# Altium footprint library SmartClimate_BOM.PcbLib: 29 footprints (part 2 of 2)
Each footprint in its own frame and in the unit in brackets; x right, y up, seen from the top. Pads: shape width x height; smd on the part's side, far side on the other; paste and mask are expansions set on the pad; w line width, h text height; cw(c..) or ccw(c..) is an arc to the next point about the centre after c.
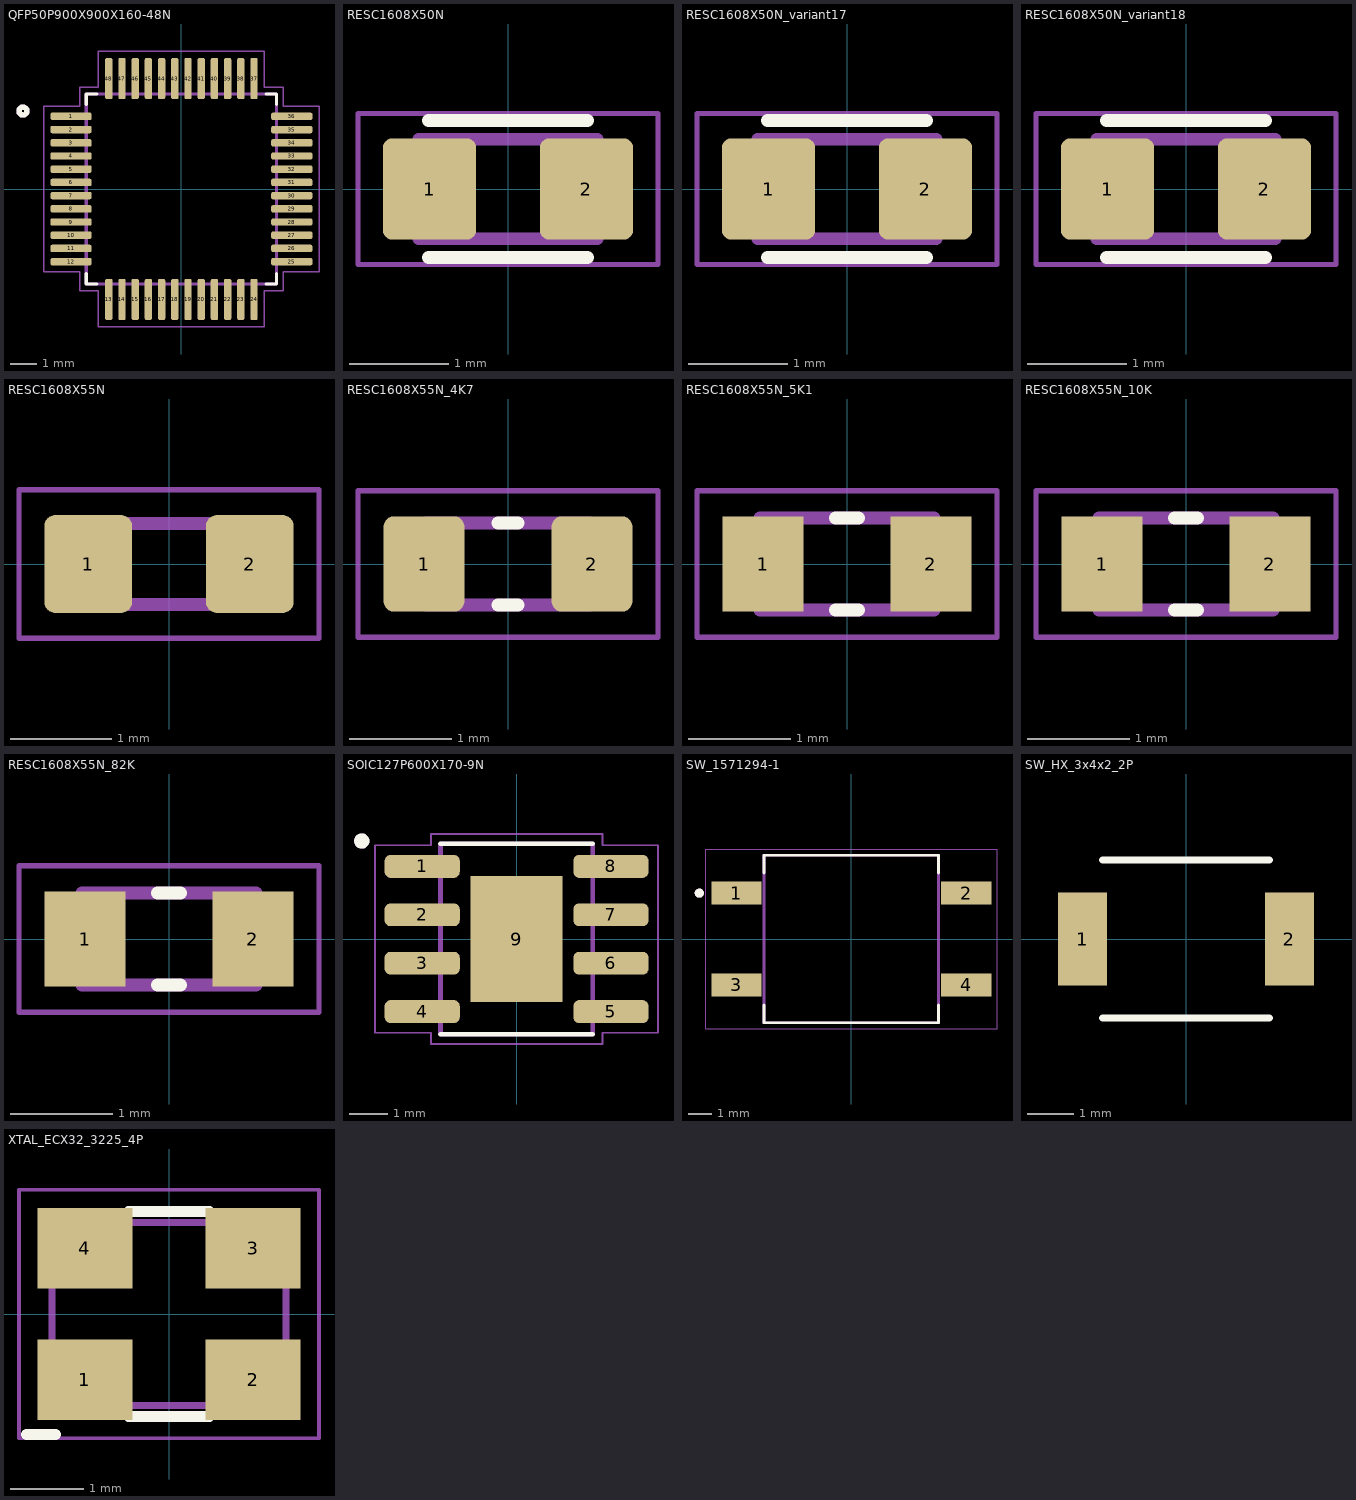
[diagram p1: the footprints below, top view; thin cyan lines are the x and y axes]

## QFP50P900X900X160-48N [mm]
pads (48):
  rrect50% 1.56x0.28 smd: 1(-4.18,2.75) 2(-4.18,2.25) 3(-4.18,1.75) 4(-4.18,1.25) 5(-4.18,0.75) 6(-4.18,0.25) 7(-4.18,-0.25) 8(-4.18,-0.75) 9(-4.18,-1.25) 10(-4.18,-1.75) 11(-4.18,-2.25) 12(-4.18,-2.75) 25(4.18,-2.75) 26(4.18,-2.25) 27(4.18,-1.75) 28(4.18,-1.25) 29(4.18,-0.75) 30(4.18,-0.25) 31(4.18,0.25) 32(4.18,0.75) 33(4.18,1.25) 34(4.18,1.75) 35(4.18,2.25) 36(4.18,2.75)
  rrect50% 0.28x1.56 smd: 13(-2.75,-4.18) 14(-2.25,-4.18) 15(-1.75,-4.18) 16(-1.25,-4.18) 17(-0.75,-4.18) 18(-0.25,-4.18) 19(0.25,-4.18) 20(0.75,-4.18) 21(1.25,-4.18) 22(1.75,-4.18) 23(2.25,-4.18) 24(2.75,-4.18) 37(2.75,4.18) 38(2.25,4.18) 39(1.75,4.18) 40(1.25,4.18) 41(0.75,4.18) 42(0.25,4.18) 43(-0.25,4.18) 44(-0.75,4.18) 45(-1.25,4.18) 46(-1.75,4.18) 47(-2.25,4.18) 48(-2.75,4.18)
Top Overlay:
  circle w0.2: c-6,2.95 r0.15
  lines w0.127: -3.6,-3.21 -3.6,-3.6 -3.21,-3.6 ; -3.6,3.21 -3.6,3.6 -3.21,3.6 ; 3.21,-3.6 3.6,-3.6 3.6,-3.21 ; 3.21,3.6 3.6,3.6 3.6,3.21
Mechanical 13:
  circle w0.2: c-6,2.95 r0.15
  lines w0.127: -3.6,-3.6 3.6,-3.6 3.6,3.6 -3.6,3.6 -3.6,-3.6
Mechanical 15:
  lines w0.05: -5.21,-3.14 -3.85,-3.14 -3.85,-3.85 -3.14,-3.85 -3.14,-5.21 3.14,-5.21 3.14,-3.85 3.85,-3.85 3.85,-3.14 5.21,-3.14 5.21,3.14 3.85,3.14 3.85,3.85 3.14,3.85 3.14,5.21 -3.14,5.21 -3.14,3.85 -3.85,3.85 -3.85,3.14 -5.21,3.14 -5.21,-3.14
3D body "step_temp.STEP": height 1.6, standoff 0, extent -4.5,-4.5 4.5,4.5

## RESC1608X50N [mm]
height 0.5
pads (2):
  rrect20% 0.94x1.02 smd: 1(-0.79,0) 2(0.79,0)
Top Overlay:
  lines w0.127: -0.8,-0.69 0.8,-0.69 ; -0.8,0.69 0.8,0.69
Mechanical 13:
  lines w0.127: -0.9,-0.5 0.9,-0.5 0.9,0.5 -0.9,0.5 -0.9,-0.5
Mechanical 15:
  lines w0.05: -1.51,-0.76 1.51,-0.76 1.51,0.76 -1.51,0.76 -1.51,-0.76
3D body: height 0.47, standoff 0.04, extent -0.8,-0.4 0.8,0.4
3D body: height 0.5, standoff 0.47, extent -0.5,-0.4 0.5,0.4
3D body: height 0.5, standoff 0, extent -0.8,-0.4 -0.55,0.4
3D body: height 0.5, standoff 0, extent 0.55,-0.4 0.8,0.4

## RESC1608X50N_variant17 [mm]
height 0.5
pads (2):
  rrect20% 0.94x1.02 smd: 1(-0.79,0) 2(0.79,0)
Top Overlay:
  lines w0.127: -0.8,-0.69 0.8,-0.69 ; -0.8,0.69 0.8,0.69
Mechanical 13:
  lines w0.127: -0.9,-0.5 -0.9,0.5 0.9,0.5 0.9,-0.5 -0.9,-0.5
Mechanical 15:
  lines w0.05: -1.51,-0.76 -1.51,0.76 1.51,0.76 1.51,-0.76 -1.51,-0.76
3D body: height 0.47, standoff 0.04, extent -0.8,-0.4 0.8,0.4
3D body: height 0.5, standoff 0.47, extent -0.5,-0.4 0.5,0.4
3D body: height 0.5, standoff 0, extent -0.8,-0.4 -0.55,0.4
3D body: height 0.5, standoff 0, extent 0.55,-0.4 0.8,0.4

## RESC1608X50N_variant18 [mm]
height 0.5
pads (2):
  rrect20% 0.94x1.02 smd: 1(-0.79,0) 2(0.79,0)
Top Overlay:
  lines w0.127: -0.8,-0.69 0.8,-0.69 ; -0.8,0.69 0.8,0.69
Mechanical 13:
  lines w0.127: -0.9,-0.5 -0.9,0.5 0.9,0.5 0.9,-0.5 -0.9,-0.5
Mechanical 15:
  lines w0.05: -1.51,-0.76 -1.51,0.76 1.51,0.76 1.51,-0.76 -1.51,-0.76
3D body: height 0.47, standoff 0.04, extent -0.8,-0.4 0.8,0.4
3D body: height 0.5, standoff 0.47, extent -0.5,-0.4 0.5,0.4
3D body: height 0.5, standoff 0, extent -0.8,-0.4 -0.55,0.4
3D body: height 0.5, standoff 0, extent 0.55,-0.4 0.8,0.4

## RESC1608X55N [mm]
height 0.55
pads (2):
  rrect25% 0.87x0.97 smd paste+0 mask+0.102: 1(-0.8,0) 2(0.8,0)
Mechanical 13:
  lines w0.127: -0.8,-0.4 0.8,-0.4 0.8,0.4 -0.8,0.4 -0.8,-0.4
Mechanical 15:
  lines w0.05: -1.485,-0.735 1.485,-0.735 1.485,0.735 -1.485,0.735 -1.485,-0.735
3D body: height 0.52, standoff 0.04, extent -0.8,-0.4 0.8,0.4
3D body: height 0.55, standoff 0.52, extent -0.5,-0.4 0.5,0.4
3D body: height 0.55, standoff 0, extent -0.8,-0.4 -0.55,0.4
3D body: height 0.55, standoff 0, extent 0.55,-0.4 0.8,0.4

## RESC1608X55N_4K7 [mm]
height 0.55
pads (2):
  rrect25% 0.79x0.93 smd: 1(-0.82,0) 2(0.82,0)
Top Overlay:
  lines w0.127: -0.1,-0.4 0.1,-0.4 ; -0.1,0.4 0.1,0.4
Mechanical 13:
  lines w0.127: -0.8,-0.4 0.8,-0.4 0.8,0.4 -0.8,0.4 -0.8,-0.4
Mechanical 15:
  lines w0.05: -1.465,-0.715 1.465,-0.715 1.465,0.715 -1.465,0.715 -1.465,-0.715
3D body "step_temp.STEP": height 0.55, standoff 0, extent -0.8,-0.4 0.8,0.4

## RESC1608X55N_5K1 [mm]
pads (2):
  rect 0.79x0.93 smd paste+0 mask+0.102: 1(-0.82,0) 2(0.82,0)
Top Overlay:
  lines w0.127: -0.11,-0.45 0.11,-0.45 ; -0.11,0.45 0.11,0.45
Mechanical 13:
  lines w0.127: -0.85,-0.45 -0.85,0.45 0.85,0.45 0.85,-0.45 -0.85,-0.45
Mechanical 15:
  lines w0.05: -1.465,-0.715 -1.465,0.715 1.465,0.715 1.465,-0.715 -1.465,-0.715
3D body "step_temp.STEP": height 0.55, standoff 0, extent -0.8,-0.4 0.8,0.4

## RESC1608X55N_10K [mm]
pads (2):
  rect 0.79x0.93 smd: 1(-0.82,0) 2(0.82,0)
Top Overlay:
  lines w0.127: -0.11,-0.45 0.11,-0.45 ; -0.11,0.45 0.11,0.45
Mechanical 13:
  lines w0.127: -0.85,-0.45 0.85,-0.45 0.85,0.45 -0.85,0.45 -0.85,-0.45
Mechanical 15:
  lines w0.05: -1.465,-0.715 1.465,-0.715 1.465,0.715 -1.465,0.715 -1.465,-0.715
3D body "step_temp.STEP": height 0.55, standoff 0, extent -0.8,-0.4 0.8,0.4

## RESC1608X55N_82K [mm]
height 0.55
pads (2):
  rect 0.79x0.93 smd: 1(-0.82,0) 2(0.82,0)
Top Overlay:
  lines w0.127: -0.11,-0.45 0.11,-0.45 ; -0.11,0.45 0.11,0.45
Mechanical 13:
  lines w0.127: -0.85,-0.45 0.85,-0.45 0.85,0.45 -0.85,0.45 -0.85,-0.45
Mechanical 15:
  lines w0.05: -1.465,-0.715 1.465,-0.715 1.465,0.715 -1.465,0.715 -1.465,-0.715
3D body: height 0.55, standoff 0, extent 0.55,-0.4 0.8,0.4
3D body: height 0.55, standoff 0, extent -0.8,-0.4 -0.55,0.4
3D body: height 0.55, standoff 0.52, extent -0.5,-0.4 0.5,0.4
3D body: height 0.52, standoff 0.04, extent -0.8,-0.4 0.8,0.4

## SOIC127P600X170-9N [mm]
pads (9):
  rrect50% 1.97x0.6 smd paste+0 mask+0.102: 1(-2.475,1.905) 2(-2.475,0.635) 3(-2.475,-0.635) 4(-2.475,-1.905) 5(2.475,-1.905) 6(2.475,-0.635) 7(2.475,0.635) 8(2.475,1.905)
  rect 2.41x3.3 smd paste-3 mask+0.102: 9(0,0)
Top Overlay:
  circle w0.2: c-4.06,2.57 r0.1
  lines w0.127: -2,-2.5 2,-2.5 ; -2,2.5 2,2.5
Top Paste:
  region: 0.935,-1.375 0.135,-1.375 0.135,-0.135 0.935,-0.135
  region: -0.135,0.135 -0.935,0.135 -0.935,1.375 -0.135,1.375
  region: -0.135,-1.375 -0.935,-1.375 -0.935,-0.135 -0.135,-0.135
  region: 0.935,0.135 0.135,0.135 0.135,1.375 0.935,1.375
Top Assembly:
  circle w0.2: c-4.06,2.57 r0.1
  lines w0.127: -2,-2.5 2,-2.5 2,2.5 -2,2.5 -2,-2.5
Top Courtyard:
  lines w0.05: -3.71,-2.46 -3.71,2.46 -2.25,2.46 -2.25,2.75 2.25,2.75 2.25,2.46 3.71,2.46 3.71,-2.46 2.25,-2.46 2.25,-2.75 -2.25,-2.75 -2.25,-2.46 -3.71,-2.46
3D body "step_temp.STEP": height 1.7, standoff 0, extent -3,-2.45 3,2.45

## SW_1571294-1 [mm]
height 4.3
pads (4):
  rect 2.2x1 smd: 1(-5,2) 2(5,2) 3(-5,-2) 4(5,-2)
Top Overlay:
  circle w0.2: c-6.621,2 r0.1
  lines w0.127: -3.8,-2.87 -3.8,-3.65 3.8,-3.65 3.8,-2.87 ; -3.8,2.87 -3.8,3.65 3.8,3.65 3.8,2.87
Bottom 3D Body:
  circle w0.2: c-6.621,2 r0.1
  circle w0.2: c-6.621,2 r0.1
  lines w0.127: -3.8,-3.65 3.8,-3.65 ; -3.8,-3.65 -3.8,3.65 ; -3.8,-3.65 3.8,-3.65 ; -3.8,-3.65 -3.8,3.65 ; -3.8,3.65 3.8,3.65 ; -3.8,3.65 3.8,3.65 ; 3.8,-3.65 3.8,3.65 ; 3.8,-3.65 3.8,3.65
Top Courtyard:
  lines w0.05: -6.35,-3.9 6.35,-3.9 6.35,3.9 -6.35,3.9 -6.35,-3.9
3D body: height 0.18, standoff 0, extent 3.4,-2.5 5.5,-1.5
3D body: height 0.18, standoff 0, extent -5.5,-2.5 -3.4,-1.5
3D body: height 0.18, standoff 0, extent -5.5,1.5 -3.4,2.5
3D body: height 0.18, standoff 0, extent 3.4,1.5 5.5,2.5
3D body: height 2.5, standoff 0.15, extent -3.8,-3.65 3.8,3.65

## SW_HX_3x4x2_2P [mm] "Hanxia HX 3x4x2-2P; pad outer span5.5 inner gap3.4 height2mm"
height 2
pads (2):
  rect 1.05x2 smd paste+0 mask+0.05: 1(-2.225,0) 2(2.225,0)
Top Overlay:
  lines w0.15: -1.8,-1.7 1.8,-1.7 ; -1.8,1.7 1.8,1.7
3D body: height 1.5, standoff 0.12, extent -2,-1.5 2,1.5
3D body: height 1.65, standoff 1.5, extent -1.9,-1.4 1.9,1.4
3D body: height 2, standoff 1.65, extent -0.9,-0.9 0.9,0.9
3D body: height 0.12, standoff 0, extent -2.45,-0.65 -2,0.65
3D body: height 0.12, standoff 0, extent 2,-0.65 2.45,0.65

## XTAL_ECX32_3225_4P [mm] "ECS ECX-32, 3.2x2.5x0.8mm; 4 pads; 1/3 crystal, 2/4 GND; manufacturer suggested land"
height 0.8
pads (4):
  rect 1.3x1.1 smd paste+0 mask+0.05: 1(-1.15,-0.9) 2(1.15,-0.9) 3(1.15,0.9) 4(-1.15,0.9)
Top Overlay:
  lines w0.15: -1.95,-1.65 -1.55,-1.65 ; -0.55,-1.4 0.55,-1.4 ; -0.55,1.4 0.55,1.4
Bottom Assembly:
  lines w0.1: -1.6,-1.25 -1.6,1.25 1.6,1.25 1.6,-1.25 -1.6,-1.25
Bottom 3D Body:
  lines w0.05: -2.05,-1.7 -2.05,1.7 2.05,1.7 2.05,-1.7 -2.05,-1.7
3D body: height 0.8, standoff 0.3, extent -1.5,-1.15 1.5,1.15